# Altium footprint library MY_LIB_Connectors_GCT.PcbLib: 20 footprints (part 2 of 2)
Each footprint in its own frame and in the unit in brackets; x right, y up, seen from the top. Pads: shape width x height; smd on the part's side, far side on the other; paste and mask are expansions set on the pad; w line width, h text height; cw(c..) or ccw(c..) is an arc to the next point about the centre after c.
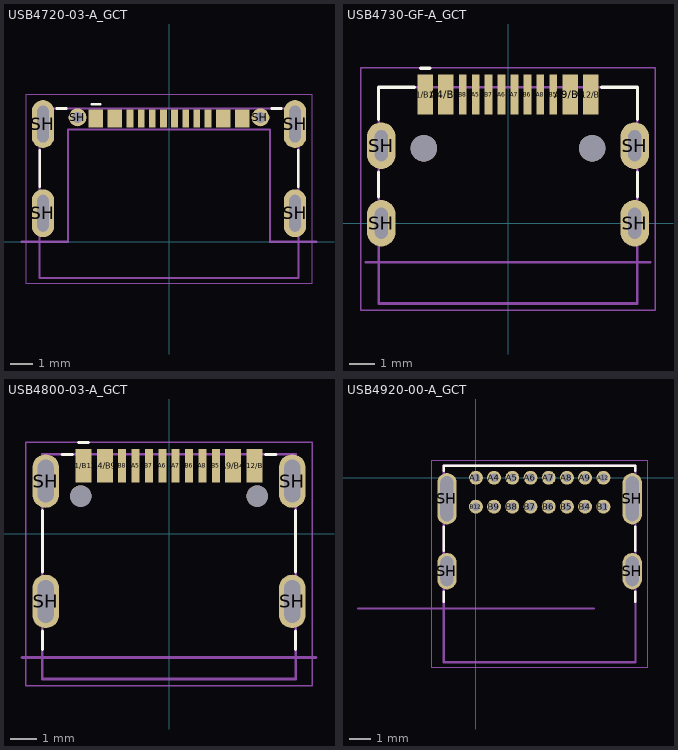
[diagram p1: the footprints below, top view; thin cyan lines are the x and y axes]

## USB4720-03-A_GCT [mm] "GCT USB4720-03-A; rebuilt from GCT drawing; embedded STEP"
height 2.124
pads (18):
  rect 0.65x0.8 smd: A1/B12(-3.275,5.53) A4/B9(-2.425,5.53) A9/B4(2.425,5.53) A12/B1(3.275,5.53)
  rect 0.3x0.8 smd: A5(-1.25,5.53) A6(-0.25,5.53) A7(0.25,5.53) A8(1.25,5.53) B5(1.75,5.53) B6(0.75,5.53) B7(-0.75,5.53) B8(-1.75,5.53)
  oval 1x2.15 hole 0.5 slot 1.65 at 90 deg: SH(-5.65,1.28) SH(-5.65,5.28) SH(5.65,1.28) SH(5.65,5.28)
  round 0.8 hole 0.5: SH(-4.1,5.58) SH(4.1,5.58)
Top Overlay:
  lines w0.12: -5.8,2.466 -5.8,4.094 ; -5.039,5.98 -4.611,5.98 ; -3.455,6.17 -3.095,6.17 ; 4.611,5.98 5.039,5.98 ; 5.8,2.466 5.8,4.094
Mechanical 1:
  lines w0.1: -5.8,-1.62 5.8,-1.62 5.8,5.98 -5.8,5.98 -5.8,-1.62
Mechanical 3:
  lines w0.1: -6.6,0 -4.525,0 -4.525,5.03 4.525,5.03 4.525,0 6.6,0
Mechanical 15:
  lines w0.05: -6.4,-1.87 6.4,-1.87 6.4,6.605 -6.4,6.605 -6.4,-1.87
3D body "USB4720-03-A.step": height 2.12, standoff -1.62, extent -5.8,-1.62 5.8,5.98

## USB4730-GF-A_GCT [mm] "GCT USB4730-GF-A; 4ms kicad lib (Unlicense); embedded STEP"
height 4.66
pads (18):
  rect 0.6x1.55 smd: A1/B12(-3.2,4.975) A4/B9(-2.4,4.975) A9/B4(2.4,4.975) A12/B1(3.2,4.975)
  rect 0.3x1.55 smd: A5(-1.25,4.975) A6(-0.25,4.975) A7(0.25,4.975) A8(1.25,4.975) B5(1.75,4.975) B6(0.75,4.975) B7(-0.75,4.975) B8(-1.75,4.975)
  oval 1.1x1.8 hole 0.5 slot 1.2 at 90 deg: SH(-4.895,0) SH(-4.895,3) SH(4.895,0) SH(4.895,3)
  round 1.02 hole 1.02 unplated: ""(-3.25,2.9) ""(3.25,2.9)
Top Overlay:
  lines w0.12: -5,1.011 -5,1.989 ; -5,4.011 -5,5.255 -3.611,5.255 ; -3.38,5.99 -3.02,5.99 ; 3.611,5.255 5,5.255 5,4.011 ; 5,1.011 5,1.989
Mechanical 1:
  lines w0.1: -5,-3.1 5,-3.1 5,5.255 -5,5.255 -5,-3.1
Mechanical 3:
  lines w0.1: -5.5,-1.5 5.5,-1.5
Mechanical 15:
  lines w0.05: -5.695,-3.35 5.695,-3.35 5.695,6 -5.695,6 -5.695,-3.35
3D body "USB4730-GF-A.step": height 4.66, standoff -0.65, extent -5,-3.1 5,5.255

## USB4800-03-A_GCT [mm] "GCT USB4800-03-A; EasyEDA/LCSC; embedded STEP"
height 5.38
pads (18):
  rect 0.6x1.25 smd: A1/B12(-3.2,2.537) A4/B9(-2.4,2.537) A9/B4(2.4,2.537) A12/B1(3.2,2.537)
  rect 0.3x1.25 smd: A5(-1.25,2.537) A6(-0.25,2.537) A7(0.25,2.537) A8(1.25,2.537) B5(1.75,2.537) B6(0.75,2.537) B7(-0.75,2.537) B8(-1.75,2.537)
  oval 1x2 hole 0.6 slot 1.6 at 90 deg: SH(-4.61,-2.538) SH(-4.61,1.963) SH(4.61,-2.538) SH(4.61,1.963)
  round 0.8 hole 0.8 unplated: ""(-3.3,1.402) ""(3.3,1.402)
Top Overlay:
  lines w0.12: -4.735,-4.327 -4.735,-3.649 ; -4.735,-1.427 -4.735,0.852 ; -3.999,2.962 -3.611,2.962 ; -3.38,3.402 -3.02,3.402 ; 3.611,2.962 3.999,2.962 ; 4.735,-4.327 4.735,-3.649 ; 4.735,-1.427 4.735,0.852
Mechanical 1:
  lines w0.1: -4.735,-5.438 4.735,-5.438 4.735,2.962 -4.735,2.962 -4.735,-5.438
Mechanical 3:
  lines w0.1: -5.5,-4.638 5.5,-4.638
Mechanical 15:
  lines w0.05: -5.36,-5.688 5.36,-5.688 5.36,3.412 -5.36,3.412 -5.36,-5.688
3D body "USB4800-03-A.step": height 5.38, standoff -1.3, extent -4.735,-5.438 4.735,2.962

## USB4920-00-A_GCT [mm] "GCT USB4920-00-A; derived from USB4085-GF-A; embedded STEP"
height 3.46
pads (20):
  round 0.65 hole 0.4: A1(0,0) A4(0.85,0) A5(1.7,0) A6(2.55,0) A7(3.4,0) A8(4.25,0) A9(5.1,0) A12(5.95,0) B1(5.95,-1.35) B4(5.1,-1.35) B5(4.25,-1.35) B6(3.4,-1.35) B7(2.55,-1.35) B8(1.7,-1.35) B9(0.85,-1.35) B12(0,-1.35)
  oval 0.9x1.7 hole 0.6 slot 1.4 at 90 deg: SH(-1.35,-4.36) SH(7.3,-4.36)
  oval 0.9x2.4 hole 0.6 slot 2.1 at 90 deg: SH(-1.35,-0.98) SH(7.3,-0.98)
Top Overlay:
  lines w0.12: -1.495,-5.79 -1.495,-5.321 ; -1.495,-3.399 -1.495,-2.291 ; -1.495,0.331 -1.495,0.56 7.445,0.56 7.445,0.331 ; -0.18,0.565 0.18,0.565 ; 7.445,-5.79 7.445,-5.321 ; 7.445,-3.399 7.445,-2.291
Mechanical 1:
  lines w0.1: -1.495,-8.61 7.445,-8.61 7.445,0.56 -1.495,0.56 -1.495,-8.61
Mechanical 3:
  lines w0.1: -5.5,-6.1 5.5,-6.1
Mechanical 15:
  lines w0.05: -2.05,-8.86 8,-8.86 8,0.81 -2.05,0.81 -2.05,-8.86
3D body "USB4920-00-A.step": height 3.46, standoff -2.1, extent -1.495,-8.61 7.445,0.56